# Altium footprint library V3_Pcblib.PcbLib: 26 footprints (part 1 of 2)
Each footprint in its own frame and in the unit in brackets; x right, y up, seen from the top. Pads: shape width x height; smd on the part's side, far side on the other; paste and mask are expansions set on the pad; w line width, h text height; cw(c..) or ccw(c..) is an arc to the next point about the centre after c.
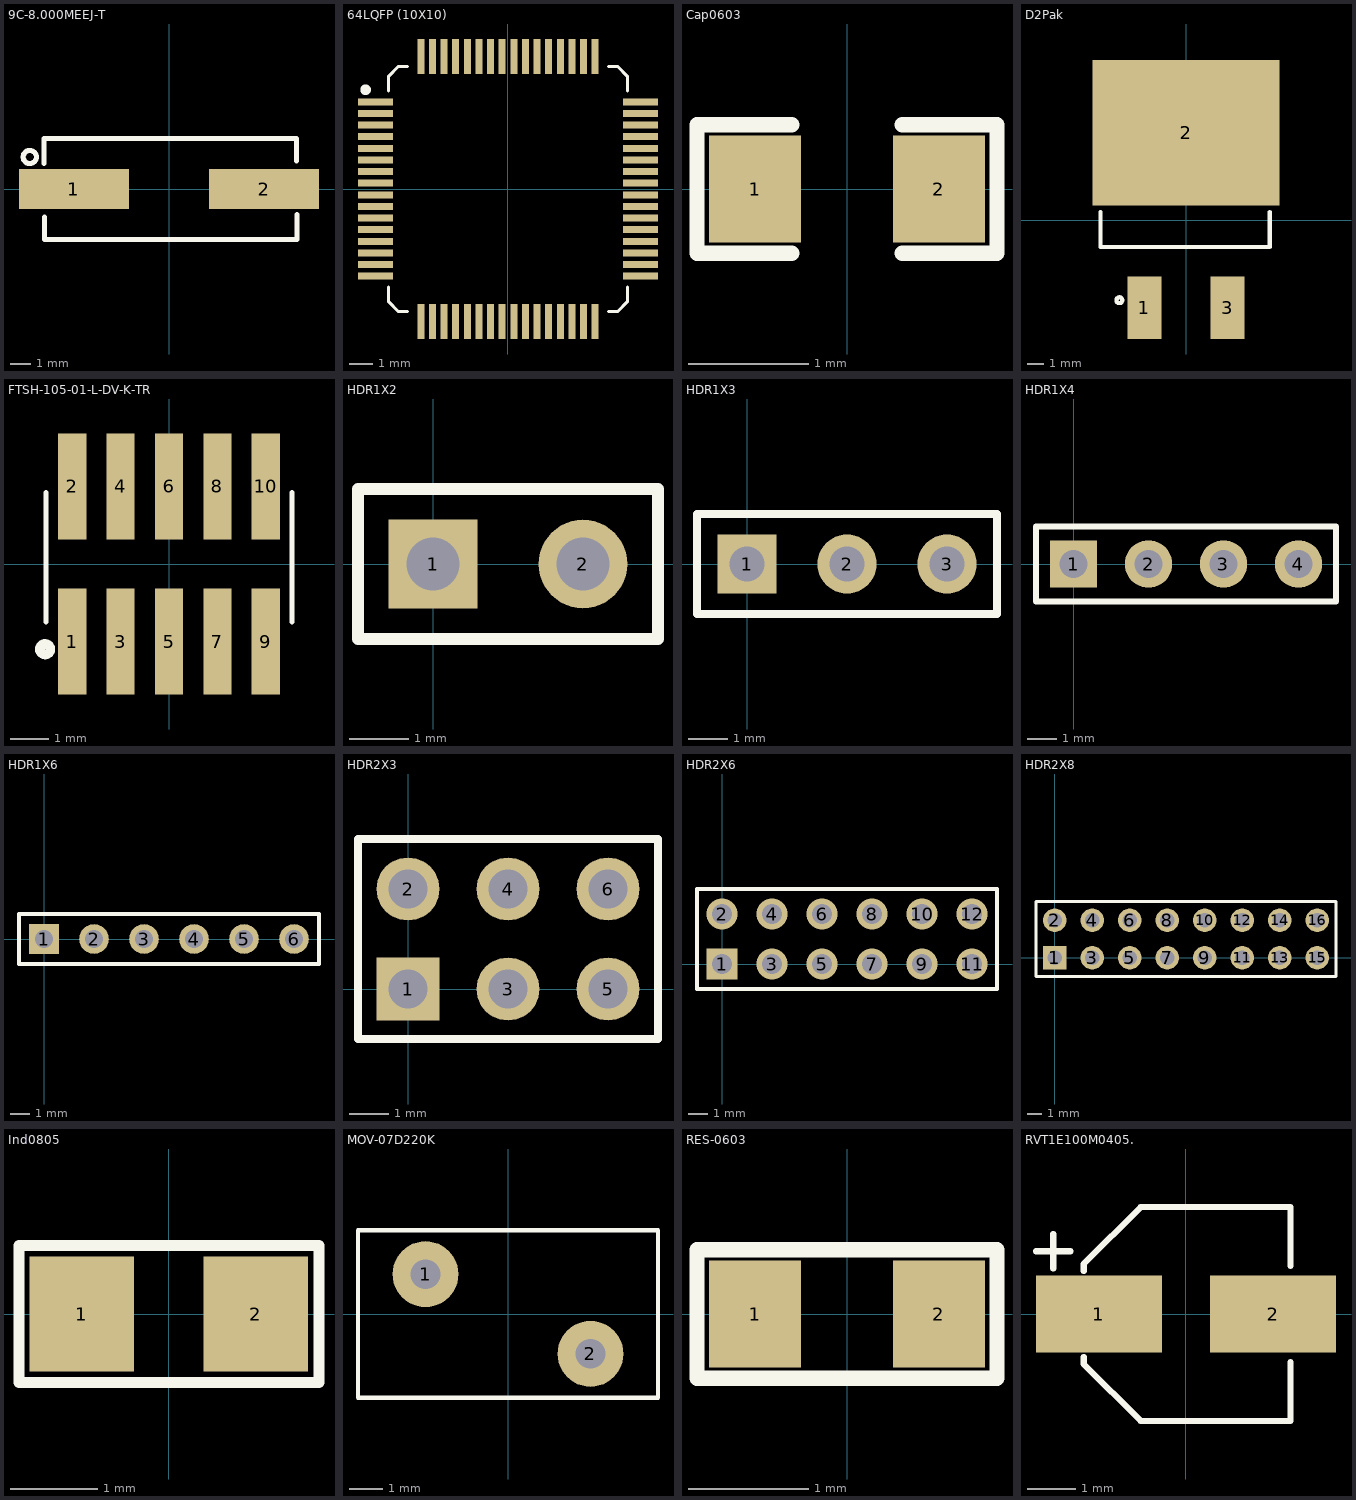
[diagram p0: the footprints below, top view; thin cyan lines are the x and y axes]

## 9C-8.000MEEJ-T [mm] "CRYSTAL 8.0000MHZ 18PF SMD"
pads (2):
  rect 5.5x2 smd: 1(-4.75,0) 2(4.75,0)
Top Overlay:
  circle w0.254: c-6.96,1.6 r0.331
  lines w0.254: -6.248,1.27 -6.248,2.515 6.375,2.515 6.375,1.397 ; -6.223,-1.397 -6.223,-2.515 6.401,-2.515 6.401,-1.27
3D body "User Library-HC-49S.step": height 4.36, standoff 0.01, extent -6.074,-2.35 6.226,2.35

## 64LQFP (10X10) [mm]
pads (64):
  rect 1.5x0.3 smd: 1(-5.7,3.75) 2(-5.7,3.25) 3(-5.7,2.75) 4(-5.7,2.25) 5(-5.7,1.75) 6(-5.7,1.25) 7(-5.7,0.75) 8(-5.7,0.25) 9(-5.7,-0.25) 10(-5.7,-0.75) 11(-5.7,-1.25) 12(-5.7,-1.75) 13(-5.7,-2.25) 14(-5.7,-2.75) 15(-5.7,-3.25) 16(-5.7,-3.75) 33(5.7,-3.75) 34(5.7,-3.25) 35(5.7,-2.75) 36(5.7,-2.25) 37(5.7,-1.75) 38(5.7,-1.25) 39(5.7,-0.75) 40(5.7,-0.25) 41(5.7,0.25) 42(5.7,0.75) 43(5.7,1.25) 44(5.7,1.75) 45(5.7,2.25) 46(5.7,2.75) 47(5.7,3.25) 48(5.7,3.75)
  rect 0.3x1.5 smd: 17(-3.75,-5.7) 18(-3.25,-5.7) 19(-2.75,-5.7) 20(-2.25,-5.7) 21(-1.75,-5.7) 22(-1.25,-5.7) 23(-0.75,-5.7) 24(-0.25,-5.7) 25(0.25,-5.7) 26(0.75,-5.7) 27(1.25,-5.7) 28(1.75,-5.7) 29(2.25,-5.7) 30(2.75,-5.7) 31(3.25,-5.7) 32(3.75,-5.7) 49(3.75,5.7) 50(3.25,5.7) 51(2.75,5.7) 52(2.25,5.7) 53(1.75,5.7) 54(1.25,5.7) 55(0.75,5.7) 56(0.25,5.7) 57(-0.25,5.7) 58(-0.75,5.7) 59(-1.25,5.7) 60(-1.75,5.7) 61(-2.25,5.7) 62(-2.75,5.7) 63(-3.25,5.7) 64(-3.75,5.7)
Top Overlay:
  circle w0.254: c-6.122,4.267 r0.102
  lines w0.127: -5.131,-4.216 -5.131,-4.851 -4.724,-5.258 -4.318,-5.258 ; -5.131,4.216 -5.131,4.851 -4.724,5.258 -4.318,5.258 ; 4.318,-5.258 4.724,-5.258 5.131,-4.851 5.131,-4.216 ; 4.318,5.258 4.724,5.258 5.131,4.851 5.131,4.216
3D body "MK20DX256VLH7--3DModel-STEP-56544.STEP": height 1.6, standoff 0, extent -6.009,-6.009 6.009,6.009

## Cap0603 [mil]
pads (2):
  rect 30x35 smd mask+2.36: 1(-30,0) 2(30,0)
Top Overlay:
  lines w5: -18,-21 -49,-21 -49,21 -18,21 ; 18,-21 49,-21 49,21 18,21
3D body "User Library-CAPC1608X09.step": height 34.25, standoff -1.18, extent -31.51,-15.75 31.49,15.74

## D2Pak [mm]
pads (3):
  rect 2.08x3.81 smd: 1(-2.54,-5.335) 3(2.54,-5.335)
  rect 11.43x8.89 smd: 2(0,5.335)
Top Overlay:
  circle w0.254: c-4.064,-4.877 r0.178
  lines w0.254: -5.207,0.508 -5.207,-1.626 5.105,-1.626 5.105,0.508
3D body "pwr263s-35-8r20f.stp": height 4.5, standoff 0, extent -5.075,-6.596 5.025,8.794

## FTSH-105-01-L-DV-K-TR [mm]
pads (10):
  rect 0.74x2.79 smd: 1(-2.54,-2.035) 2(-2.54,2.035) 3(-1.27,-2.035) 4(-1.27,2.035) 5(0,-2.035) 6(0,2.035) 7(1.27,-2.035) 8(1.27,2.035) 9(2.54,-2.035) 10(2.54,2.035)
Top Overlay:
  circle w0.254: c-3.251,-2.235 r0.137
  lines w0.127: -3.226,-1.524 -3.226,1.88 ; 3.226,-1.524 3.226,1.88
3D body "ftsh-105-01-l-dv-k-tr.stp": height 6.11, standoff -0.59, extent -3.175,-2.845 3.175,2.997

## HDR1X2 [mm] "CONN HEADER VERT 2POS 2.54MM"
pads (2):
  rect 1.5x1.5 hole 0.9: 1(0,0)
  round 1.5 hole 0.9: 2(2.54,0)
Top Overlay:
  lines w0.2: -1.27,-1.27 3.81,-1.27 3.81,1.27 -1.27,1.27 -1.27,-1.27
3D body "User Library-Header1x2.STEP": height 8.44, standoff -2.54, extent -1.27,-1.27 3.81,1.27

## HDR1X3 [mm] "Connector; Header; 3 Position"
pads (3):
  rect 1.5x1.5 hole 0.9: 1(0,0)
  round 1.5 hole 0.9: 2(2.54,0) 3(5.08,0)
Top Overlay:
  lines w0.2: -1.27,-1.27 6.35,-1.27 6.35,1.27 -1.27,1.27 -1.27,-1.27
3D body "User Library-Header_Male_3Pin.STEP": height 8.54, standoff -3, extent -1.27,-1.245 6.35,1.245

## HDR1X4 [mm] "Connector; Header; 4 Position"
pads (4):
  rect 1.6x1.6 hole 0.95: 1(0,0)
  round 1.6 hole 0.95: 2(2.54,0) 3(5.08,0) 4(7.62,0)
Top Overlay:
  lines w0.2: -1.27,-1.27 -1.27,1.27 8.89,1.27 8.89,-1.27 -1.27,-1.27
3D body "User Library-1x4 TH Pitch 2_54mm.STEP": height 9.5, standoff -3.2, extent -1.27,-1.27 8.89,1.27

## HDR1X6 [mm] "Connector; Header; 6 Position"
pads (6):
  rect 1.5x1.5 hole 0.9: 1(0,0)
  round 1.5 hole 0.9: 2(2.54,0) 3(5.08,0) 4(7.62,0) 5(10.16,0) 6(12.7,0)
Top Overlay:
  lines w0.2: -1.27,-1.27 -1.27,1.27 13.97,1.27 13.97,-1.27 -1.27,-1.27
3D body "User Library-Header_Male_6Pin.STEP": height 8.54, standoff -3, extent -1.27,-1.245 13.97,1.245

## HDR2X3 [mm] "Connector; Header; 3x2 Position"
pads (6):
  rect 1.6x1.6 hole 1: 1(0,0)
  round 1.6 hole 1: 2(0,2.54) 3(2.54,0) 4(2.54,2.54) 5(5.08,0) 6(5.08,2.54)
Top Overlay:
  lines w0.2: 1.482,-1.27 6.35,-1.27 ; 6.35,-1.27 -1.27,-1.27 -1.27,3.81 6.35,3.81 6.35,-1.27
3D body "User Library-2x3 TH Pitch 2_54mm.STEP": height 9.2, standoff -3.5, extent -1.27,-1.295 6.35,3.785

## HDR2X6 [mm] "Connector; Header; 6x2 Position"
pads (12):
  rect 1.6x1.6 hole 1: 1(0,0)
  round 1.6 hole 1: 2(0,2.54) 3(2.54,0) 4(2.54,2.54) 5(5.08,0) 6(5.08,2.54) 7(7.62,0) 8(7.62,2.54) 9(10.16,0) 10(10.16,2.54) 11(12.7,0) 12(12.7,2.54)
Top Overlay:
  lines w0.2: -1.27,-1.27 13.97,-1.27 13.97,3.81 -1.27,3.81 -1.27,-1.27

## HDR2X8 [mm] "Connector; Header; 8x2 Position"
pads (16):
  rect 1.6x1.6 hole 1: 1(0,0)
  round 1.6 hole 1: 2(0,2.54) 3(2.54,0) 4(2.54,2.54) 5(5.08,0) 6(5.08,2.54) 7(7.62,0) 8(7.62,2.54) 9(10.16,0) 10(10.16,2.54) 11(12.7,0) 12(12.7,2.54) 13(15.24,0) 14(15.24,2.54) 15(17.78,0) 16(17.78,2.54)
Top Overlay:
  lines w0.2: -1.27,-1.27 19.05,-1.27 19.05,3.81 -1.27,3.81 -1.27,-1.27

## Ind0805 [mm] "Inductor 0805"
pads (2):
  rect 1.2x1.32 smd: 1(-1,0) 2(1,0)
Top Overlay:
  lines w0.127: -1.723,-0.787 -1.723,0.787 1.727,0.787 1.727,-0.787 -1.723,-0.787
3D body "45637.stp": height 0.47, standoff -0.03, extent -1,-0.625 1,0.625

## MOV-07D220K [mm]
pads (2):
  round 2 hole 0.9: 1(-2.5,1.206) 2(2.5,-1.206)
Top Overlay:
  lines w0.127: -4.547,-2.54 4.547,-2.54 4.547,2.54 -4.547,2.54 -4.547,-2.54
3D body "MOV-07D471K--3DModel-STEP-56544.STEP": height 12.5, standoff -16.5, extent -4.5,-2.5 4.5,2.5

## RES-0603 [mil]
pads (2):
  rect 30x35 smd: 1(-30,0) 2(30,0)
Top Overlay:
  lines w5: -49,-21 49,-21 49,21 -49,21 -49,-21
3D body "User Library-RESC1608X05N.step": height 17.76, standoff 0, extent -30.52,-16.74 30.51,16.73

## RVT1E100M0405. [mm] "10uF 25V 5.4mm SMD"
pads (2):
  rect 2.6x1.6 smd: 1(-1.8,0) 2(1.8,0)
Top Overlay:
  lines w0.127: -3.099,1.295 -2.388,1.295 ; -2.743,0.94 -2.743,1.651 ; -2.115,-0.889 -2.115,-1.035 -0.94,-2.21 2.159,-2.21 2.159,-0.991 ; -2.115,0.889 -2.115,1.035 -0.94,2.21 2.159,2.21 2.159,0.991
3D body "roqangrvt1e100m0405.stp": height 3.95, standoff -0.05, extent -2.65,-2.15 2.65,2.15